# Altium schematic symbol library CD4021BM96.SchLib: 1 symbol
Pins are listed as number, name and electrical type; pins without a type are passive.

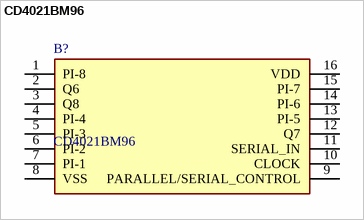
[diagram p0: symbol CD4021BM96]

## CD4021BM96
designator B?
CMOS 8-Stage Static Shift Register; Manufacturer_Name: Texas Instruments; Geometry.Height: 1.75mm; Mouser Part Number: 595-CD4021BM96; Mouser Price/Stock: https://www.mouser.co.uk/ProductDetail/Texas-Instruments/CD4021BM96?qs=vmM6vcLFxxF7B4lvHkHOug%3D%3D; Manufacturer_Part_Number: CD4021BM96; Datasheet Link: http://www.ti.com/lit/gpn/CD4021B
footprint SOIC127P600X175-16N
pins: 1 PI-8, 2 Q6, 3 Q8, 4 PI-4, 5 PI-3, 6 PI-2, 7 PI-1, 8 VSS, 9 PARALLEL/SERIAL_CONTROL, 10 CLOCK, 11 SERIAL_IN, 12 Q7, 13 PI-5, 14 PI-6, 15 PI-7, 16 VDD